# Altium footprint library CWF-6.PcbLib: 1 footprints
Each footprint in its own frame and in the unit in brackets; x right, y up, seen from the top. Pads: shape width x height; smd on the part's side, far side on the other; paste and mask are expansions set on the pad; w line width, h text height; cw(c..) or ccw(c..) is an arc to the next point about the centre after c.
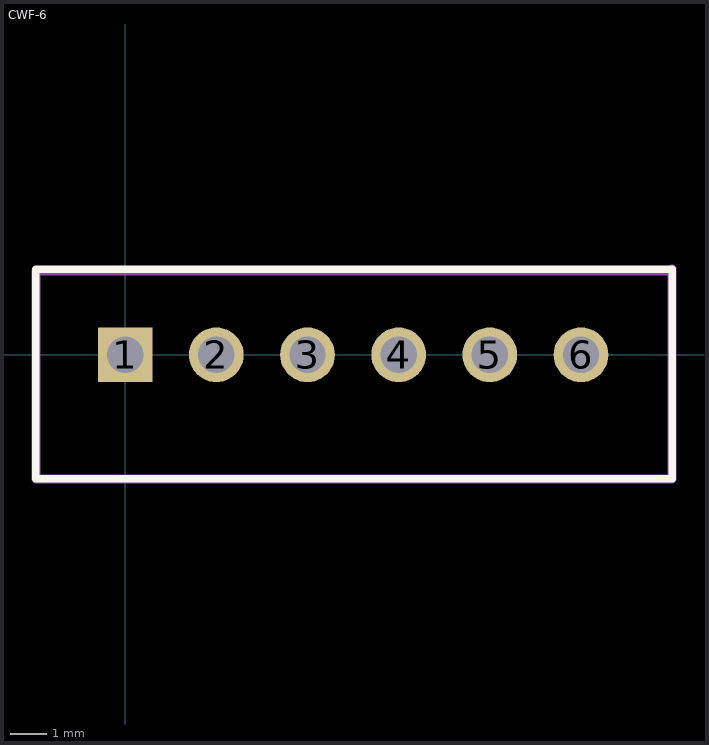
[diagram p0: the footprint, top view; thin cyan lines are the x and y axes]

## CWF-6 [mm]
pads (6):
  rect 1.5x1.5 hole 1: 1(0,0)
  round 1.5 hole 1: 2(2.5,0) 3(5,0) 4(7.5,0) 5(10,0) 6(12.5,0)
Top Overlay:
  lines w0.2: -2.45,-3.4 15,-3.4 15,2.35 -2.45,2.35 -2.45,-3.4
Mechanical 4:
  lines w0.25: 15,2.3 -2.45,2.3 -2.45,-3.4 15,-3.4 15,2.35
  text ".Designator" at 0.7,-2 h2.15
3D body "User Library-CWF-6.STEP": height 7, standoff -3.5, extent -2.5,-3.55 15,2.2